# Altium footprint library BT_Multi_Lib.PcbLib: 3 footprints
Each footprint in its own frame and in the unit in brackets; x right, y up, seen from the top. Pads: shape width x height; smd on the part's side, far side on the other; paste and mask are expansions set on the pad; w line width, h text height; cw(c..) or ccw(c..) is an arc to the next point about the centre after c.
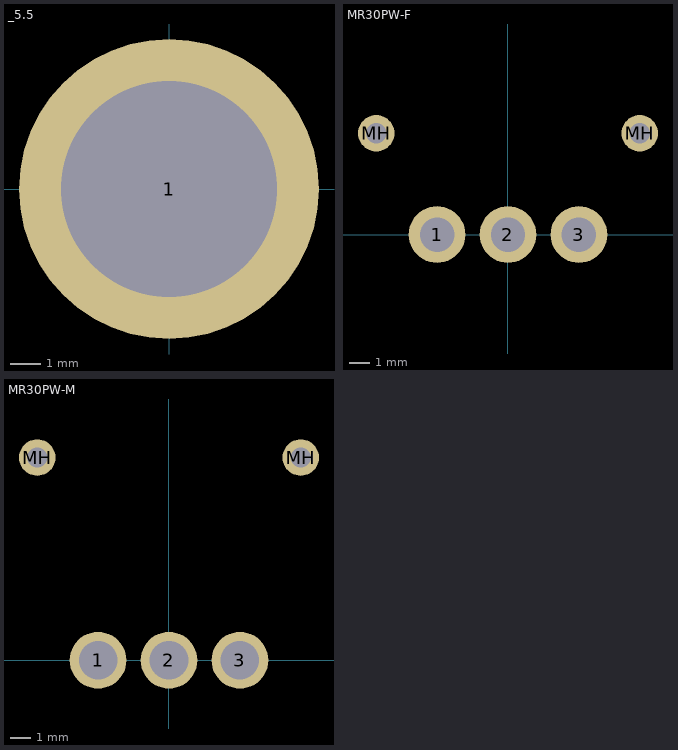
[diagram p0: the footprints below, top view; thin cyan lines are the x and y axes]

## _5.5 [mm]
pads (1):
  round 10 hole 7.2: 1(0,0)

## MR30PW-F [mm]
pads (5):
  round 2.8 hole 1.7: 1(-3.5,0) 2(0,0) 3(3.5,0)
  round 1.8 hole 1: MH(-6.5,5) MH(6.5,5)

## MR30PW-M [mm]
pads (5):
  round 2.8 hole 1.9: 1(-3.5,0) 2(0,0) 3(3.5,0)
  round 1.8 hole 1: MH(-6.5,10) MH(6.5,10)